# Altium schematic symbol library CRG0805F1K0.SchLib: 1 symbol
Pins are listed as number, name and electrical type; pins without a type are passive.

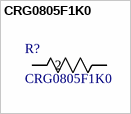
[diagram p0: symbol CRG0805F1K0]

## CRG0805F1K0
designator R?
CRG0805 1% 1K0; Manufacturer_Name: TE Connectivity; Copyright: Copyright (C) 2026 Ultra Librarian. All rights reserved.; Manufacturer_Part_Number: CRG0805F1K0; Datasheet: https://www.te.com/commerce/DocumentDelivery/DDEController?Action=srchrtrv&DocNm=1773204&DocType=Data+Sheet&DocLang=English&PartCntxt=1623131-1&DocFormat=pdf
footprint RES0805_CRG_TYCO_TYC
pins: 1, 2